# EAGLE library part XIAO_nRF52840 (library JR)
nRF52840 module with LiPo charger, 3V3 regulator, USB-C; castellated edge, SWD and battery pads
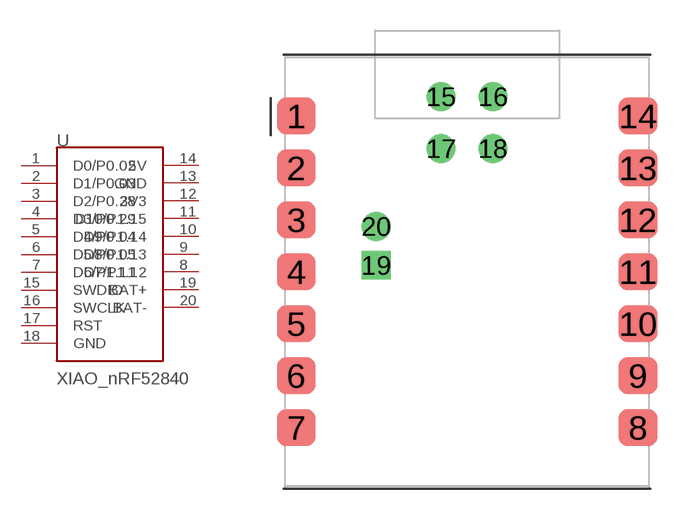
[diagram p1: symbol with the pads of XIAO_nRF52840_SMD; footprint XIAO_nRF52840_SMD]

Designator prefix U

## XIAO_nRF52840 (DESCRIPTION: nRF52840 module with LiPo charger, 3V3 regulator, USB-C; castellated edge, SWD and battery pads; MANUFACTURER: Seeed Studio; MPN: 102010448)  [XIAO_nRF52840_SMD]
1  D0/P0.02  pas
2  D1/P0.03  pas
3  D2/P0.28  pas
4  D3/P0.29  pas
5  D4/P0.04  pas
6  D5/P0.05  pas
7  D6/P1.11  pas
8  D7/P1.12  pas
9  D8/P1.13  pas
10  D9/P1.14  pas
11  D10/P1.15  pas
12  3V3  pas
13  GND  pas
14  5V  pas
15  SWDIO  pas
16  SWCLK  pas
17  RST  pas
18  GND  pas
19  BAT+  pas
20  BAT-  pas

## Footprint XIAO_nRF52840_SMD (pad centres in mm)
Seeed XIAO nRF52840 soldered flat by its castellated pads. Pads trimmed to 9.3 mm from centre so it fits the 19.8 mm neck. Plated holes 19/20 reach the underside BAT pads (solder from below); 15-18 reach the SWD pads. BAT and SWD hole positions checked 2026-11-10 against Seeed's XIAO nRF52840 v1.3 board layout and its official footprint (Seeed-Studio/OPL_Kicad_Library XIAO-nRF52840-SMD): BAT+/BAT- are on the D0-D6 side. The XIAO's NFC pads (unused) sit at (3.81, 9.21) and (5.715, 9.21), at the antenna end: keep vias away from them.
smd 1.9 x 1.8: 1 -8.35,7.62; 2 -8.35,5.08; 3 -8.35,2.54; 4 -8.35,0; 5 -8.35,-2.54; 6 -8.35,-5.08; 7 -8.35,-7.62; 8 8.35,-7.62; 9 8.35,-5.08; 10 8.35,-2.54; 11 8.35,0; 12 8.35,2.54; 13 8.35,5.08; 14 8.35,7.62
drill 0.9 pad 1.4 round: 15 -1.27,8.572; 16 1.27,8.572; 17 -1.27,6.032; 18 1.27,6.032; 20 -4.445,2.222
drill 0.9 pad 1.4 square: 19 -4.445,0.317